# Altium footprint library Package_DFN_QFN.PcbLib: 735 footprints (part 40 of 46)
Each footprint in its own frame and in the unit in brackets; x right, y up, seen from the top. Pads: shape width x height; smd on the part's side, far side on the other; paste and mask are expansions set on the pad; w line width, h text height; cw(c..) or ccw(c..) is an arc to the next point about the centre after c.
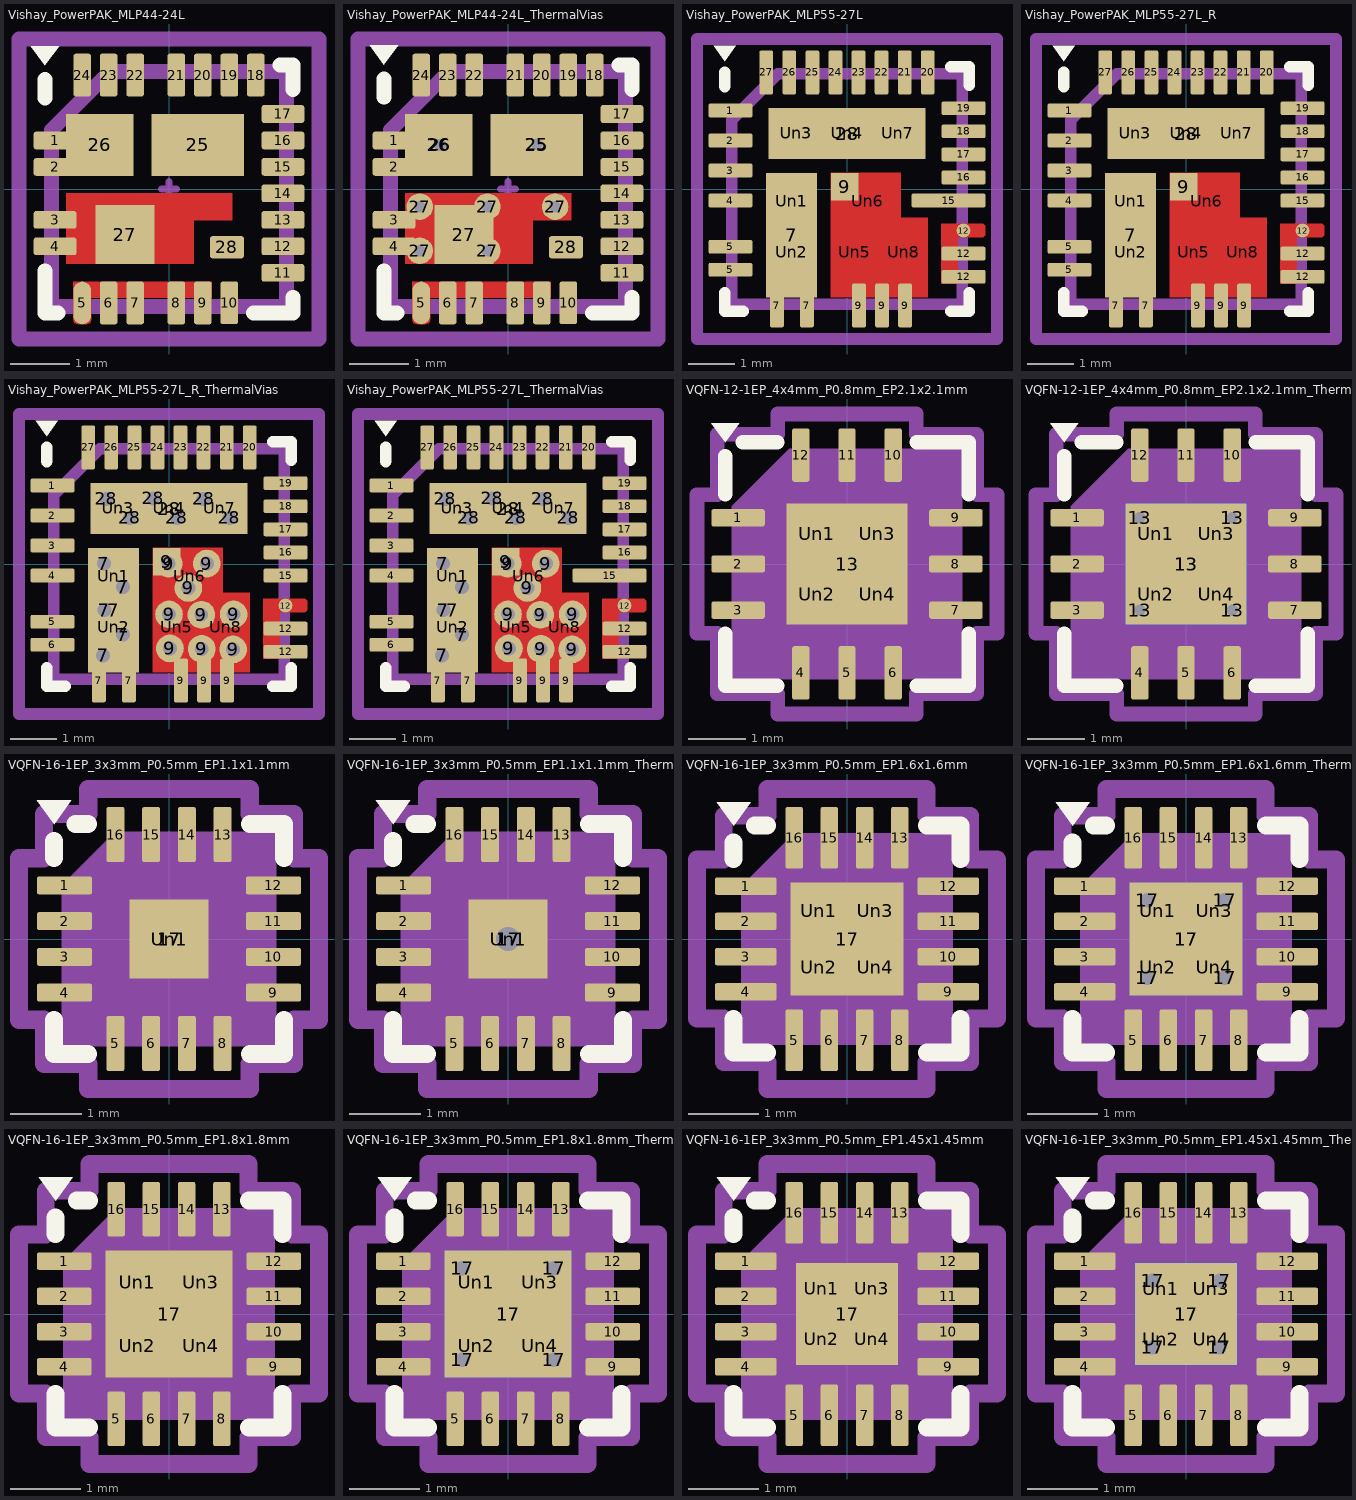
[diagram p39: the footprints below, top view; thin cyan lines are the x and y axes]

## Vishay_PowerPAK_MLP44-24L [mm] "Vishay_PowerPAK_MLP44-24L"
pads (28):
  rrect25% 0.725x0.3 smd: 1(-1.937,0.825) 2(-1.937,0.375) 3(-1.937,-0.525) 4(-1.937,-0.975) 11(1.937,-1.425) 12(1.937,-0.975) 13(1.937,-0.525) 14(1.937,-0.075) 15(1.937,0.375) 16(1.937,0.825) 17(1.937,1.275)
  oval 0.3x0.725 smd: 5(-1.475,-1.937)
  rrect25% 0.3x0.725 smd: 6(-1.025,-1.937) 7(-0.575,-1.937) 8(0.125,-1.937) 9(0.575,-1.937) 10(1.025,-1.935) 18(1.475,1.937) 19(1.025,1.937) 20(0.575,1.937) 21(0.125,1.937) 22(-0.575,1.937) 23(-1.025,1.937) 24(-1.475,1.937)
  rect 1.575x1.05 smd: 25(0.487,0.75)
  rect 1.15x1.05 smd: 26(-1.175,0.75)
  rect 1x1 smd: 27(-0.75,-0.775)
  rrect25% 0.58x0.38 smd: 28(0.985,-0.99)
F.Cu:
  region: 1.075,-0.53 0.425,-0.53 0.425,-1.275 -1.75,-1.275 -1.75,-0.075 1.075,-0.075
  region: 0.725,-1.85 -1.625,-1.85 -1.625,-1.575 0.725,-1.575
  region: -1.371,-1.581 -1.347,-1.597 -1.331,-1.621 -1.325,-1.65 -1.325,-2.225 -1.331,-2.254 -1.347,-2.278 -1.371,-2.294 -1.4,-2.3 -1.55,-2.3 -1.579,-2.294 -1.603,-2.278 -1.619,-2.254 -1.625,-2.225 -1.625,-1.65 -1.619,-1.621 -1.603,-1.597 -1.579,-1.581 -1.55,-1.575 -1.4,-1.575
F.SilkS:
  region: -2.11,2.1 -2.35,2.43 -1.87,2.43
  lines w0.254: -2.11,-1.39 -2.11,-2.11 -1.89,-2.11 ; -2.11,1.55 -2.11,1.86 ; 1.44,-2.11 2.11,-2.11 2.11,-1.84 ; 1.89,2.11 2.11,2.11 2.11,1.69
F.Paste:
  region: 1.075,-0.53 0.425,-0.53 0.425,-1.275 -1.75,-1.275 -1.75,-0.075 1.075,-0.075
  region: 0.725,-1.85 -1.625,-1.85 -1.625,-1.575 0.725,-1.575
  region: -1.371,-1.581 -1.347,-1.597 -1.331,-1.621 -1.325,-1.65 -1.325,-2.225 -1.331,-2.254 -1.347,-2.278 -1.371,-2.294 -1.4,-2.3 -1.55,-2.3 -1.579,-2.294 -1.603,-2.278 -1.619,-2.254 -1.625,-2.225 -1.625,-1.65 -1.619,-1.621 -1.603,-1.597 -1.579,-1.581 -1.55,-1.575 -1.4,-1.575
F.Mask:
  region: 1.075,-0.53 0.425,-0.53 0.425,-1.275 -1.75,-1.275 -1.75,-0.075 1.075,-0.075
  region: 0.725,-1.85 -1.625,-1.85 -1.625,-1.575 0.725,-1.575
  region: -1.371,-1.581 -1.347,-1.597 -1.331,-1.621 -1.325,-1.65 -1.325,-2.225 -1.331,-2.254 -1.347,-2.278 -1.371,-2.294 -1.4,-2.3 -1.55,-2.3 -1.579,-2.294 -1.603,-2.278 -1.619,-2.254 -1.625,-2.225 -1.625,-1.65 -1.619,-1.621 -1.603,-1.597 -1.579,-1.581 -1.55,-1.575 -1.4,-1.575
Top Component Center:
  lines w0.127: -0.127,0 0.127,0 -0.127,0 ; 0,-0.127 0,0.127 0,-0.127
Top Assembly:
  lines w0.254: -2,-2 2,-2 2,2 -1,2 -2,1 -2,-2
Top Courtyard:
  lines w0.254: -2.55,-2.55 2.55,-2.55 2.55,2.55 -2.55,2.55 -2.55,-2.55
Top Designator:
  text ".Designator" at -3.43,-0.344 h1.52
3D body "Vishay_PowerPAK_MLP44-24L.step": height 0.75, standoff -0.01, extent -2.01,-2.01 2.01,2.01

## Vishay_PowerPAK_MLP44-24L_ThermalVias [mm] "Vishay_PowerPAK_MLP44-24L_ThermalVias"
pads (35):
  rrect25% 0.725x0.3 smd: 1(-1.937,0.825) 2(-1.937,0.375) 3(-1.937,-0.525) 4(-1.937,-0.975) 11(1.937,-1.425) 12(1.937,-0.975) 13(1.937,-0.525) 14(1.937,-0.075) 15(1.937,0.375) 16(1.937,0.825) 17(1.937,1.275)
  oval 0.3x0.725 smd: 5(-1.475,-1.937)
  rrect25% 0.3x0.725 smd: 6(-1.025,-1.937) 7(-0.575,-1.937) 8(0.125,-1.937) 9(0.575,-1.937) 10(1.025,-1.935) 18(1.475,1.937) 19(1.025,1.937) 20(0.575,1.937) 21(0.125,1.937) 22(-0.575,1.937) 23(-1.025,1.937) 24(-1.475,1.937)
  rect 1.575x1.05 smd: 25(0.487,0.75)
  round 0.45 hole 0.2: 25(0.49,0.76) 26(-1.155,0.75) 27(-1.5,-1.05) 27(-1.5,-0.3) 27(-0.35,-1.05) 27(-0.35,-0.3) 27(0.8,-0.3)
  rect 1.15x1.05 smd: 26(-1.175,0.75)
  rect 1x1 smd: 27(-0.75,-0.775)
  rrect25% 0.58x0.38 smd: 28(0.985,-0.99)
F.Cu:
  region: -1.371,-1.581 -1.347,-1.597 -1.331,-1.621 -1.325,-1.65 -1.325,-2.225 -1.331,-2.254 -1.347,-2.278 -1.371,-2.294 -1.4,-2.3 -1.55,-2.3 -1.579,-2.294 -1.603,-2.278 -1.619,-2.254 -1.625,-2.225 -1.625,-1.65 -1.619,-1.621 -1.603,-1.597 -1.579,-1.581 -1.55,-1.575 -1.4,-1.575
  region: 0.725,-1.85 -1.625,-1.85 -1.625,-1.575 0.725,-1.575
  region: 1.075,-0.53 0.425,-0.53 0.425,-1.275 -1.75,-1.275 -1.75,-0.075 1.075,-0.075
F.SilkS:
  region: -2.11,2.11 -2.35,2.44 -1.87,2.44
  lines w0.254: -2.11,-1.39 -2.11,-2.11 -1.89,-2.11 ; -2.11,1.56 -2.11,1.87 ; 1.44,-2.11 2.11,-2.11 2.11,-1.84 ; 1.89,2.11 2.11,2.11 2.11,1.69
F.Paste:
  region: -1.371,-1.581 -1.347,-1.597 -1.331,-1.621 -1.325,-1.65 -1.325,-2.225 -1.331,-2.254 -1.347,-2.278 -1.371,-2.294 -1.4,-2.3 -1.55,-2.3 -1.579,-2.294 -1.603,-2.278 -1.619,-2.254 -1.625,-2.225 -1.625,-1.65 -1.619,-1.621 -1.603,-1.597 -1.579,-1.581 -1.55,-1.575 -1.4,-1.575
  region: 0.725,-1.85 -1.625,-1.85 -1.625,-1.575 0.725,-1.575
  region: 1.075,-0.53 0.425,-0.53 0.425,-1.275 -1.75,-1.275 -1.75,-0.075 1.075,-0.075
F.Mask:
  region: -1.371,-1.581 -1.347,-1.597 -1.331,-1.621 -1.325,-1.65 -1.325,-2.225 -1.331,-2.254 -1.347,-2.278 -1.371,-2.294 -1.4,-2.3 -1.55,-2.3 -1.579,-2.294 -1.603,-2.278 -1.619,-2.254 -1.625,-2.225 -1.625,-1.65 -1.619,-1.621 -1.603,-1.597 -1.579,-1.581 -1.55,-1.575 -1.4,-1.575
  region: 0.725,-1.85 -1.625,-1.85 -1.625,-1.575 0.725,-1.575
  region: 1.075,-0.53 0.425,-0.53 0.425,-1.275 -1.75,-1.275 -1.75,-0.075 1.075,-0.075
Top Component Center:
  lines w0.127: -0.127,0 0.127,0 -0.127,0 ; 0,-0.127 0,0.127 0,-0.127
Top Assembly:
  lines w0.254: -2,-2 -2,1 -1,2 2,2 2,-2 -2,-2
Top Courtyard:
  lines w0.254: -2.55,-2.55 -2.55,2.55 2.55,2.55 2.55,-2.55 -2.55,-2.55
Top Designator:
  text ".Designator" at -3.43,-0.344 h1.52
3D body "Vishay_PowerPAK_MLP44-24L.step": height 0.75, standoff -0.01, extent -2.01,-2.01 2.01,2.01

## Vishay_PowerPAK_MLP55-27L [mm] "Vishay_PowerPAK_MLP55-27L"
pads (38):
  rrect25% 0.95x0.3 smd: 1(-2.525,1.7) 2(-2.525,1.05) 3(-2.525,0.4) 4(-2.525,-0.25) 5(-2.525,-1.75) 5(-2.525,-1.25) 12(2.525,-1.9) 12(2.525,-1.4) 16(2.525,0.25) 17(2.525,0.75) 18(2.525,1.25) 19(2.525,1.75)
  rrect25% 0.3x0.95 smd: 7(-1.52,-2.525) 7(-0.87,-2.525) 9(0.26,-2.525) 9(0.76,-2.525) 9(1.26,-2.525) 20(1.75,2.525) 21(1.25,2.525) 22(0.75,2.525) 23(0.25,2.525) 24(-0.25,2.525) 25(-0.75,2.525) 26(-1.25,2.525) 27(-1.75,2.525)
  rect 1.1x2.7 smd: 7(-1.2,-1)
  rect 0.6x0.6 smd: 9(-0.05,0.05)
  round 0.3 smd: 12(2.525,-0.9)
  rrect25% 1.6x0.3 smd: 15(2.2,-0.25)
  rect 3.4x1.1 smd: 28(0,1.2)
  rrect25% 0.85x0.85 on Top Paste: Un1(-1.2,-0.27) Un2(-1.2,-1.37) Un3(-1.1,1.21) Un4(0,1.21) Un5(0.17,-1.37) Un6(0.45,-0.27) Un7(1.1,1.21) Un8(1.23,-1.37)
F.Cu:
  region: 2.954,-0.756 2.978,-0.772 2.994,-0.796 3,-0.825 3,-0.975 2.994,-1.004 2.978,-1.028 2.954,-1.044 2.925,-1.05 2.125,-1.05 2.096,-1.044 2.072,-1.028 2.056,-1.004 2.05,-0.975 2.05,-0.825 2.056,-0.796 2.072,-0.772 2.096,-0.756 2.125,-0.75 2.925,-0.75
  region: 2.395,-2.05 2.045,-2.05 2.045,-0.75 2.395,-0.75
  region: 1.17,-0.62 1.75,-0.62 1.75,-2.35 -0.35,-2.35 -0.35,0.35 1.17,0.35
F.SilkS:
  region: -2.65,2.77 -2.89,3.1 -2.41,3.1
  lines w0.254: -2.65,-2.25 -2.65,-2.65 -2.25,-2.65 ; -2.65,2.22 -2.65,2.53 ; 2.25,-2.65 2.65,-2.65 2.65,-2.25 ; 2.25,2.65 2.65,2.65 2.65,2.25
F.Paste:
  region: 2.954,-0.756 2.978,-0.772 2.994,-0.796 3,-0.825 3,-0.975 2.994,-1.004 2.978,-1.028 2.954,-1.044 2.925,-1.05 2.125,-1.05 2.096,-1.044 2.072,-1.028 2.056,-1.004 2.05,-0.975 2.05,-0.825 2.056,-0.796 2.072,-0.772 2.096,-0.756 2.125,-0.75 2.925,-0.75
  region: 2.395,-2.05 2.045,-2.05 2.045,-0.75 2.395,-0.75
F.Mask:
  region: 2.954,-0.756 2.978,-0.772 2.994,-0.796 3,-0.825 3,-0.975 2.994,-1.004 2.978,-1.028 2.954,-1.044 2.925,-1.05 2.125,-1.05 2.096,-1.044 2.072,-1.028 2.056,-1.004 2.05,-0.975 2.05,-0.825 2.056,-0.796 2.072,-0.772 2.096,-0.756 2.125,-0.75 2.925,-0.75
  region: 2.395,-2.05 2.045,-2.05 2.045,-0.75 2.395,-0.75
  region: 1.17,-0.62 1.75,-0.62 1.75,-2.35 -0.35,-2.35 -0.35,0.35 1.17,0.35
Top Component Center:
  lines w0.127: -0.127,0 0.127,0 -0.127,0 ; 0,-0.127 0,0.127 0,-0.127
Top Assembly:
  lines w0.254: -2.5,-2.5 2.5,-2.5 2.5,2.5 -1.5,2.5 -2.5,1.5 -2.5,-2.5
Top Courtyard:
  lines w0.254: -3.25,-3.25 3.25,-3.25 3.25,3.25 -3.25,3.25 -3.25,-3.25
Top Designator:
  text ".Designator" at -3.43,-0.344 h1.52

## Vishay_PowerPAK_MLP55-27L_R [mm] "Vishay_PowerPAK_MLP55-27L_R"
pads (38):
  rrect25% 0.95x0.3 smd: 1(-2.525,1.7) 2(-2.525,1.05) 3(-2.525,0.4) 4(-2.525,-0.25) 5(-2.525,-1.75) 5(-2.525,-1.25) 12(2.525,-1.9) 12(2.525,-1.4) 15(2.525,-0.25) 16(2.525,0.25) 17(2.525,0.75) 18(2.525,1.25) 19(2.525,1.75)
  rrect25% 0.3x0.95 smd: 7(-1.52,-2.525) 7(-0.87,-2.525) 9(0.26,-2.525) 9(0.76,-2.525) 9(1.26,-2.525) 20(1.75,2.525) 21(1.25,2.525) 22(0.75,2.525) 23(0.25,2.525) 24(-0.25,2.525) 25(-0.75,2.525) 26(-1.25,2.525) 27(-1.75,2.525)
  rect 1.1x2.7 smd: 7(-1.2,-1)
  rect 0.6x0.6 smd: 9(-0.05,0.05)
  round 0.3 smd: 12(2.525,-0.9)
  rect 3.4x1.1 smd: 28(0,1.2)
  rrect25% 0.85x0.85 on Top Paste: Un1(-1.2,-0.27) Un2(-1.2,-1.37) Un3(-1.1,1.21) Un4(0,1.21) Un5(0.17,-1.37) Un6(0.45,-0.27) Un7(1.1,1.21) Un8(1.23,-1.37)
F.Cu:
  region: 1.17,-0.62 1.75,-0.62 1.75,-2.35 -0.35,-2.35 -0.35,0.35 1.17,0.35
  region: 2.395,-2.05 2.045,-2.05 2.045,-0.75 2.395,-0.75
  region: 2.954,-0.756 2.978,-0.772 2.994,-0.796 3,-0.825 3,-0.975 2.994,-1.004 2.978,-1.028 2.954,-1.044 2.925,-1.05 2.125,-1.05 2.096,-1.044 2.072,-1.028 2.056,-1.004 2.05,-0.975 2.05,-0.825 2.056,-0.796 2.072,-0.772 2.096,-0.756 2.125,-0.75 2.925,-0.75
F.SilkS:
  region: -2.65,2.77 -2.89,3.1 -2.41,3.1
  lines w0.254: -2.65,-2.25 -2.65,-2.65 -2.25,-2.65 ; -2.65,2.22 -2.65,2.53 ; 2.25,-2.65 2.65,-2.65 2.65,-2.25 ; 2.25,2.65 2.65,2.65 2.65,2.25
F.Paste:
  region: 2.395,-2.05 2.045,-2.05 2.045,-0.75 2.395,-0.75
  region: 2.954,-0.756 2.978,-0.772 2.994,-0.796 3,-0.825 3,-0.975 2.994,-1.004 2.978,-1.028 2.954,-1.044 2.925,-1.05 2.125,-1.05 2.096,-1.044 2.072,-1.028 2.056,-1.004 2.05,-0.975 2.05,-0.825 2.056,-0.796 2.072,-0.772 2.096,-0.756 2.125,-0.75 2.925,-0.75
F.Mask:
  region: 1.17,-0.62 1.75,-0.62 1.75,-2.35 -0.35,-2.35 -0.35,0.35 1.17,0.35
  region: 2.395,-2.05 2.045,-2.05 2.045,-0.75 2.395,-0.75
  region: 2.954,-0.756 2.978,-0.772 2.994,-0.796 3,-0.825 3,-0.975 2.994,-1.004 2.978,-1.028 2.954,-1.044 2.925,-1.05 2.125,-1.05 2.096,-1.044 2.072,-1.028 2.056,-1.004 2.05,-0.975 2.05,-0.825 2.056,-0.796 2.072,-0.772 2.096,-0.756 2.125,-0.75 2.925,-0.75
Top Component Center:
  lines w0.127: -0.127,0 0.127,0 -0.127,0 ; 0,-0.127 0,0.127 0,-0.127
Top Assembly:
  lines w0.254: -2.5,-2.5 -2.5,1.5 -1.5,2.5 2.5,2.5 2.5,-2.5 -2.5,-2.5
Top Courtyard:
  lines w0.254: -3.25,-3.25 -3.25,3.25 3.25,3.25 3.25,-3.25 -3.25,-3.25
Top Designator:
  text ".Designator" at -3.43,-0.344 h1.52

## Vishay_PowerPAK_MLP55-27L_R_ThermalVias [mm] "Vishay_PowerPAK_MLP55-27L_R_ThermalVias"
pads (58):
  rrect25% 0.95x0.3 smd: 1(-2.525,1.7) 2(-2.525,1.05) 3(-2.525,0.4) 4(-2.525,-0.25) 5(-2.525,-1.25) 6(-2.525,-1.75) 12(2.525,-1.9) 12(2.525,-1.4) 15(2.525,-0.25) 16(2.525,0.25) 17(2.525,0.75) 18(2.525,1.25) 19(2.525,1.75)
  rrect25% 0.3x0.95 smd: 7(-1.52,-2.525) 7(-0.87,-2.525) 9(0.26,-2.525) 9(0.76,-2.525) 9(1.26,-2.525) 20(1.75,2.525) 21(1.25,2.525) 22(0.75,2.525) 23(0.25,2.525) 24(-0.25,2.525) 25(-0.75,2.525) 26(-1.25,2.525) 27(-1.75,2.525)
  round 0.6 hole 0.3: 7(-1.43,-1.98) 7(-1.41,0.01) 7(-1.4,-1) 7(-1,-1.53) 7(-1,-0.5) 9(-0.01,0.01) 9(0,-1.09) 9(0.02,-1.83) 9(0.42,-0.52) 9(0.7,-1.1) 9(0.71,-1.84) 9(0.82,0.01) 9(1.39,-1.85) 9(1.4,-1.09) 28(-1.36,1.41) 28(-0.85,1) 28(-0.34,1.42) 28(0.17,1) 28(0.75,1.41) 28(1.31,1)
  rect 1.1x2.7 smd: 7(-1.2,-1)
  rect 0.6x0.6 smd: 9(-0.05,0.05)
  round 0.3 smd: 12(2.525,-0.9)
  rect 3.4x1.1 smd: 28(0,1.2)
  rrect25% 0.85x0.85 on Top Paste: Un1(-1.2,-0.27) Un2(-1.2,-1.37) Un3(-1.1,1.21) Un4(0,1.21) Un5(0.17,-1.37) Un6(0.45,-0.27) Un7(1.1,1.21) Un8(1.23,-1.37)
F.Cu:
  region: 1.17,-0.62 1.75,-0.62 1.75,-2.35 -0.35,-2.35 -0.35,0.35 1.17,0.35
  region: 2.954,-0.756 2.978,-0.772 2.994,-0.796 3,-0.825 3,-0.975 2.994,-1.004 2.978,-1.028 2.954,-1.044 2.925,-1.05 2.125,-1.05 2.096,-1.044 2.072,-1.028 2.056,-1.004 2.05,-0.975 2.05,-0.825 2.056,-0.796 2.072,-0.772 2.096,-0.756 2.125,-0.75 2.925,-0.75
  region: 2.395,-2.05 2.045,-2.05 2.045,-0.75 2.395,-0.75
F.SilkS:
  region: -2.65,2.77 -2.89,3.1 -2.41,3.1
  lines w0.254: -2.65,-2.25 -2.65,-2.65 -2.25,-2.65 ; -2.65,2.22 -2.65,2.53 ; 2.25,-2.65 2.65,-2.65 2.65,-2.25 ; 2.25,2.65 2.65,2.65 2.65,2.25
F.Paste:
  region: 2.954,-0.756 2.978,-0.772 2.994,-0.796 3,-0.825 3,-0.975 2.994,-1.004 2.978,-1.028 2.954,-1.044 2.925,-1.05 2.125,-1.05 2.096,-1.044 2.072,-1.028 2.056,-1.004 2.05,-0.975 2.05,-0.825 2.056,-0.796 2.072,-0.772 2.096,-0.756 2.125,-0.75 2.925,-0.75
  region: 2.395,-2.05 2.045,-2.05 2.045,-0.75 2.395,-0.75
F.Mask:
  region: 1.17,-0.62 1.75,-0.62 1.75,-2.35 -0.35,-2.35 -0.35,0.35 1.17,0.35
  region: 2.954,-0.756 2.978,-0.772 2.994,-0.796 3,-0.825 3,-0.975 2.994,-1.004 2.978,-1.028 2.954,-1.044 2.925,-1.05 2.125,-1.05 2.096,-1.044 2.072,-1.028 2.056,-1.004 2.05,-0.975 2.05,-0.825 2.056,-0.796 2.072,-0.772 2.096,-0.756 2.125,-0.75 2.925,-0.75
  region: 2.395,-2.05 2.045,-2.05 2.045,-0.75 2.395,-0.75
Top Component Center:
  lines w0.127: -0.127,0 0.127,0 -0.127,0 ; 0,-0.127 0,0.127 0,-0.127
Top Assembly:
  lines w0.254: -2.5,-2.5 -2.5,1.5 -1.5,2.5 2.5,2.5 2.5,-2.5 -2.5,-2.5
Top Courtyard:
  lines w0.254: -3.25,-3.25 -3.25,3.25 3.25,3.25 3.25,-3.25 -3.25,-3.25
Top Designator:
  text ".Designator" at -3.44,-0.334 h1.52

## Vishay_PowerPAK_MLP55-27L_ThermalVias [mm] "Vishay_PowerPAK_MLP55-27L_ThermalVias"
pads (58):
  rrect25% 0.95x0.3 smd: 1(-2.525,1.7) 2(-2.525,1.05) 3(-2.525,0.4) 4(-2.525,-0.25) 5(-2.525,-1.25) 6(-2.525,-1.75) 12(2.525,-1.9) 12(2.525,-1.4) 16(2.525,0.25) 17(2.525,0.75) 18(2.525,1.25) 19(2.525,1.75)
  rrect25% 0.3x0.95 smd: 7(-1.52,-2.525) 7(-0.87,-2.525) 9(0.26,-2.525) 9(0.76,-2.525) 9(1.26,-2.525) 20(1.75,2.525) 21(1.25,2.525) 22(0.75,2.525) 23(0.25,2.525) 24(-0.25,2.525) 25(-0.75,2.525) 26(-1.25,2.525) 27(-1.75,2.525)
  round 0.6 hole 0.3: 7(-1.43,-1.98) 7(-1.41,0.01) 7(-1.4,-1) 7(-1,-1.53) 7(-1,-0.5) 9(-0.01,0.01) 9(0,-1.09) 9(0.02,-1.83) 9(0.42,-0.52) 9(0.7,-1.1) 9(0.71,-1.84) 9(0.82,0.01) 9(1.39,-1.85) 9(1.4,-1.09) 28(-1.36,1.41) 28(-0.85,1) 28(-0.34,1.42) 28(0.17,1) 28(0.75,1.41) 28(1.31,1)
  rect 1.1x2.7 smd: 7(-1.2,-1)
  rect 0.6x0.6 smd: 9(-0.05,0.05)
  round 0.3 smd: 12(2.525,-0.9)
  rrect25% 1.6x0.3 smd: 15(2.2,-0.25)
  rect 3.4x1.1 smd: 28(0,1.2)
  rrect25% 0.85x0.85 on Top Paste: Un1(-1.2,-0.27) Un2(-1.2,-1.37) Un3(-1.1,1.21) Un4(0,1.21) Un5(0.17,-1.37) Un6(0.45,-0.27) Un7(1.1,1.21) Un8(1.23,-1.37)
F.Cu:
  region: 1.17,-0.62 1.75,-0.62 1.75,-2.35 -0.35,-2.35 -0.35,0.35 1.17,0.35
  region: 2.954,-0.756 2.978,-0.772 2.994,-0.796 3,-0.825 3,-0.975 2.994,-1.004 2.978,-1.028 2.954,-1.044 2.925,-1.05 2.125,-1.05 2.096,-1.044 2.072,-1.028 2.056,-1.004 2.05,-0.975 2.05,-0.825 2.056,-0.796 2.072,-0.772 2.096,-0.756 2.125,-0.75 2.925,-0.75
  region: 2.395,-2.05 2.045,-2.05 2.045,-0.75 2.395,-0.75
F.SilkS:
  region: -2.65,2.77 -2.89,3.1 -2.41,3.1
  lines w0.254: -2.65,-2.25 -2.65,-2.65 -2.25,-2.65 ; -2.65,2.22 -2.65,2.53 ; 2.25,-2.65 2.65,-2.65 2.65,-2.25 ; 2.25,2.65 2.65,2.65 2.65,2.25
F.Paste:
  region: 2.954,-0.756 2.978,-0.772 2.994,-0.796 3,-0.825 3,-0.975 2.994,-1.004 2.978,-1.028 2.954,-1.044 2.925,-1.05 2.125,-1.05 2.096,-1.044 2.072,-1.028 2.056,-1.004 2.05,-0.975 2.05,-0.825 2.056,-0.796 2.072,-0.772 2.096,-0.756 2.125,-0.75 2.925,-0.75
  region: 2.395,-2.05 2.045,-2.05 2.045,-0.75 2.395,-0.75
F.Mask:
  region: 1.17,-0.62 1.75,-0.62 1.75,-2.35 -0.35,-2.35 -0.35,0.35 1.17,0.35
  region: 2.954,-0.756 2.978,-0.772 2.994,-0.796 3,-0.825 3,-0.975 2.994,-1.004 2.978,-1.028 2.954,-1.044 2.925,-1.05 2.125,-1.05 2.096,-1.044 2.072,-1.028 2.056,-1.004 2.05,-0.975 2.05,-0.825 2.056,-0.796 2.072,-0.772 2.096,-0.756 2.125,-0.75 2.925,-0.75
  region: 2.395,-2.05 2.045,-2.05 2.045,-0.75 2.395,-0.75
Top Component Center:
  lines w0.127: -0.127,0 0.127,0 -0.127,0 ; 0,-0.127 0,0.127 0,-0.127
Top Assembly:
  lines w0.254: -2.5,-2.5 -2.5,1.5 -1.5,2.5 2.5,2.5 2.5,-2.5 -2.5,-2.5
Top Courtyard:
  lines w0.254: -3.25,-3.25 -3.25,3.25 3.25,3.25 3.25,-3.25 -3.25,-3.25
Top Designator:
  text ".Designator" at -3.44,-0.334 h1.52

## VQFN-12-1EP_4x4mm_P0.8mm_EP2.1x2.1mm [mm] "VQFN-12-1EP_4x4mm_P0.8mm_EP2.1x2.1mm"
pads (17):
  rrect25% 0.925x0.3 smd: 1(-1.887,0.8) 2(-1.887,0) 3(-1.887,-0.8) 7(1.887,-0.8) 8(1.887,0) 9(1.887,0.8)
  rrect25% 0.3x0.925 smd: 4(-0.8,-1.887) 5(0,-1.887) 6(0.8,-1.887) 10(0.8,1.887) 11(0,1.887) 12(-0.8,1.887)
  rect 2.1x2.1 smd: 13(0,0)
  rrect25% 0.85x0.85 on Top Paste: Un1(-0.525,0.525) Un2(-0.525,-0.525) Un3(0.525,0.525) Un4(0.525,-0.525)
F.SilkS:
  region: -2.11,2.11 -2.35,2.44 -1.87,2.44
  lines w0.254: -2.11,-1.21 -2.11,-2.11 -1.21,-2.11 ; -2.11,1.21 -2.11,1.87 ; -1.81,2.11 -1.21,2.11 ; 1.21,-2.11 2.11,-2.11 2.11,-1.21 ; 1.21,2.11 2.11,2.11 2.11,1.21
Top Component Center:
  lines w0.127: -0.127,0 0.127,0 -0.127,0 ; 0,-0.127 0,0.127 0,-0.127
Top Assembly:
  region: 2,-2 -2,-2 -2,1 -1,2 2,2
Top Courtyard:
  lines w0.254: -2.6,-1.2 -2.25,-1.2 -2.25,-2.25 -1.2,-2.25 -1.2,-2.6 1.2,-2.6 1.2,-2.25 2.25,-2.25 2.25,-1.2 2.6,-1.2 2.6,1.2 2.25,1.2 2.25,2.25 1.2,2.25 1.2,2.6 -1.2,2.6 -1.2,2.25 -2.25,2.25 -2.25,1.2 -2.6,1.2 -2.6,-1.2
Top Designator:
  text ".Designator" at -3.43,-0.344 h1.52
3D body "VQFN-12-1EP_4x4mm_P0.8mm_EP2.1x2.1mm.step": height 0.85, standoff 0, extent -2,-2 2,2

## VQFN-12-1EP_4x4mm_P0.8mm_EP2.1x2.1mm_ThermalVias [mm] "VQFN-12-1EP_4x4mm_P0.8mm_EP2.1x2.1mm_ThermalVias"
pads (22):
  rrect25% 0.925x0.3 smd: 1(-1.887,0.8) 2(-1.887,0) 3(-1.887,-0.8) 7(1.887,-0.8) 8(1.887,0) 9(1.887,0.8)
  rrect25% 0.3x0.925 smd: 4(-0.8,-1.887) 5(0,-1.887) 6(0.8,-1.887) 10(0.8,1.887) 11(0,1.887) 12(-0.8,1.887)
  round 0.5 hole 0.2: 13(-0.8,-0.8) 13(-0.8,0.8) 13(0.8,-0.8) 13(0.8,0.8)
  rect 2.1x2.1 smd: 13(0,0)
  rect 2.1x2.1 smd far side: 13(0,0)
  rrect25% 0.85x0.85 on Top Paste: Un1(-0.525,0.525) Un2(-0.525,-0.525) Un3(0.525,0.525) Un4(0.525,-0.525)
F.SilkS:
  region: -2.11,2.11 -2.35,2.44 -1.87,2.44
  lines w0.254: -2.11,-1.21 -2.11,-2.11 -1.21,-2.11 ; -2.11,1.21 -2.11,1.87 ; -1.81,2.11 -1.21,2.11 ; 1.21,-2.11 2.11,-2.11 2.11,-1.21 ; 1.21,2.11 2.11,2.11 2.11,1.21
Top Component Center:
  lines w0.127: -0.127,0 0.127,0 -0.127,0 ; 0,-0.127 0,0.127 0,-0.127
Top Assembly:
  region: 2,-2 -2,-2 -2,1 -1,2 2,2
Top Courtyard:
  lines w0.254: -2.6,-1.2 -2.25,-1.2 -2.25,-2.25 -1.2,-2.25 -1.2,-2.6 1.2,-2.6 1.2,-2.25 2.25,-2.25 2.25,-1.2 2.6,-1.2 2.6,1.2 2.25,1.2 2.25,2.25 1.2,2.25 1.2,2.6 -1.2,2.6 -1.2,2.25 -2.25,2.25 -2.25,1.2 -2.6,1.2 -2.6,-1.2
Top Designator:
  text ".Designator" at -3.43,-0.344 h1.52
3D body "VQFN-12-1EP_4x4mm_P0.8mm_EP2.1x2.1mm.step": height 0.85, standoff 0, extent -2,-2 2,2

## VQFN-16-1EP_3x3mm_P0.5mm_EP1.1x1.1mm [mm] "VQFN-16-1EP_3x3mm_P0.5mm_EP1.1x1.1mm"
pads (18):
  rrect25% 0.775x0.25 smd: 1(-1.462,0.75) 2(-1.462,0.25) 3(-1.462,-0.25) 4(-1.462,-0.75) 9(1.462,-0.75) 10(1.462,-0.25) 11(1.462,0.25) 12(1.462,0.75)
  rrect25% 0.25x0.775 smd: 5(-0.75,-1.462) 6(-0.25,-1.462) 7(0.25,-1.462) 8(0.75,-1.462) 13(0.75,1.462) 14(0.25,1.462) 15(-0.25,1.462) 16(-0.75,1.462)
  rect 1.1x1.1 smd: 17(0,0)
  rrect25% 0.89x0.89 on Top Paste: Un1(0,0)
F.SilkS:
  region: -1.61,1.61 -1.85,1.94 -1.37,1.94
  lines w0.254: -1.61,-1.135 -1.61,-1.61 -1.135,-1.61 ; -1.61,1.135 -1.61,1.37 ; -1.31,1.61 -1.135,1.61 ; 1.135,-1.61 1.61,-1.61 1.61,-1.135 ; 1.135,1.61 1.61,1.61 1.61,1.135
Top Component Center:
  lines w0.127: -0.127,0 0.127,0 -0.127,0 ; 0,-0.127 0,0.127 0,-0.127
Top Assembly:
  region: 1.5,-1.5 -1.5,-1.5 -1.5,0.75 -0.75,1.5 1.5,1.5
Top Courtyard:
  lines w0.254: -2.1,-1.13 -1.75,-1.13 -1.75,-1.75 -1.13,-1.75 -1.13,-2.1 1.13,-2.1 1.13,-1.75 1.75,-1.75 1.75,-1.13 2.1,-1.13 2.1,1.13 1.75,1.13 1.75,1.75 1.13,1.75 1.13,2.1 -1.13,2.1 -1.13,1.75 -1.75,1.75 -1.75,1.13 -2.1,1.13 -2.1,-1.13
Top Designator:
  text ".Designator" at -3.43,-0.344 h1.52

## VQFN-16-1EP_3x3mm_P0.5mm_EP1.1x1.1mm_ThermalVias [mm] "VQFN-16-1EP_3x3mm_P0.5mm_EP1.1x1.1mm_ThermalVias"
pads (20):
  rrect25% 0.775x0.25 smd: 1(-1.462,0.75) 2(-1.462,0.25) 3(-1.462,-0.25) 4(-1.462,-0.75) 9(1.462,-0.75) 10(1.462,-0.25) 11(1.462,0.25) 12(1.462,0.75)
  rrect25% 0.25x0.775 smd: 5(-0.75,-1.462) 6(-0.25,-1.462) 7(0.25,-1.462) 8(0.75,-1.462) 13(0.75,1.462) 14(0.25,1.462) 15(-0.25,1.462) 16(-0.75,1.462)
  rect 1.1x1.1 smd: 17(0,0)
  round 0.63 hole 0.33: 17(0,0)
  rect 0.63x0.63 smd far side: 17(0,0)
  rrect25% 0.89x0.89 on Top Paste: Un1(0,0)
F.SilkS:
  region: -1.61,1.61 -1.85,1.94 -1.37,1.94
  lines w0.254: -1.61,-1.135 -1.61,-1.61 -1.135,-1.61 ; -1.61,1.135 -1.61,1.37 ; -1.31,1.61 -1.135,1.61 ; 1.135,-1.61 1.61,-1.61 1.61,-1.135 ; 1.135,1.61 1.61,1.61 1.61,1.135
Top Component Center:
  lines w0.127: -0.127,0 0.127,0 -0.127,0 ; 0,-0.127 0,0.127 0,-0.127
Top Assembly:
  region: 1.5,-1.5 -1.5,-1.5 -1.5,0.75 -0.75,1.5 1.5,1.5
Top Courtyard:
  lines w0.254: -2.1,-1.13 -2.1,1.13 -1.75,1.13 -1.75,1.75 -1.13,1.75 -1.13,2.1 1.13,2.1 1.13,1.75 1.75,1.75 1.75,1.13 2.1,1.13 2.1,-1.13 1.75,-1.13 1.75,-1.75 1.13,-1.75 1.13,-2.1 -1.13,-2.1 -1.13,-1.75 -1.75,-1.75 -1.75,-1.13 -2.1,-1.13
Top Designator:
  text ".Designator" at -3.43,-0.344 h1.52

## VQFN-16-1EP_3x3mm_P0.5mm_EP1.6x1.6mm [mm] "VQFN-16-1EP_3x3mm_P0.5mm_EP1.6x1.6mm"
pads (21):
  rrect25% 0.875x0.25 smd: 1(-1.438,0.75) 2(-1.438,0.25) 3(-1.438,-0.25) 4(-1.438,-0.75) 9(1.438,-0.75) 10(1.438,-0.25) 11(1.438,0.25) 12(1.438,0.75)
  rrect25% 0.25x0.875 smd: 5(-0.75,-1.438) 6(-0.25,-1.438) 7(0.25,-1.438) 8(0.75,-1.438) 13(0.75,1.438) 14(0.25,1.438) 15(-0.25,1.438) 16(-0.75,1.438)
  rect 1.6x1.6 smd: 17(0,0)
  rrect25% 0.64x0.64 on Top Paste: Un1(-0.4,0.4) Un2(-0.4,-0.4) Un3(0.4,0.4) Un4(0.4,-0.4)
F.SilkS:
  region: -1.61,1.61 -1.85,1.94 -1.37,1.94
  lines w0.254: -1.61,-1.135 -1.61,-1.61 -1.135,-1.61 ; -1.61,1.135 -1.61,1.37 ; -1.31,1.61 -1.135,1.61 ; 1.135,-1.61 1.61,-1.61 1.61,-1.135 ; 1.135,1.61 1.61,1.61 1.61,1.135
Top Component Center:
  lines w0.127: -0.127,0 0.127,0 -0.127,0 ; 0,-0.127 0,0.127 0,-0.127
Top Assembly:
  region: 1.5,-1.5 -1.5,-1.5 -1.5,0.75 -0.75,1.5 1.5,1.5
Top Courtyard:
  lines w0.254: -2.13,-1.13 -1.75,-1.13 -1.75,-1.75 -1.13,-1.75 -1.13,-2.13 1.13,-2.13 1.13,-1.75 1.75,-1.75 1.75,-1.13 2.13,-1.13 2.13,1.13 1.75,1.13 1.75,1.75 1.13,1.75 1.13,2.13 -1.13,2.13 -1.13,1.75 -1.75,1.75 -1.75,1.13 -2.13,1.13 -2.13,-1.13
Top Designator:
  text ".Designator" at -3.43,-0.344 h1.52

## VQFN-16-1EP_3x3mm_P0.5mm_EP1.6x1.6mm_ThermalVias [mm] "VQFN-16-1EP_3x3mm_P0.5mm_EP1.6x1.6mm_ThermalVias"
pads (26):
  rrect25% 0.875x0.25 smd: 1(-1.438,0.75) 2(-1.438,0.25) 3(-1.438,-0.25) 4(-1.438,-0.75) 9(1.438,-0.75) 10(1.438,-0.25) 11(1.438,0.25) 12(1.438,0.75)
  rrect25% 0.25x0.875 smd: 5(-0.75,-1.438) 6(-0.25,-1.438) 7(0.25,-1.438) 8(0.75,-1.438) 13(0.75,1.438) 14(0.25,1.438) 15(-0.25,1.438) 16(-0.75,1.438)
  round 0.5 hole 0.2: 17(-0.55,-0.55) 17(-0.55,0.55) 17(0.55,-0.55) 17(0.55,0.55)
  rect 1.6x1.6 smd: 17(0,0)
  rect 1.6x1.6 smd far side: 17(0,0)
  rrect25% 0.69x0.69 on Top Paste: Un1(-0.4,0.4) Un2(-0.4,-0.4) Un3(0.4,0.4) Un4(0.4,-0.4)
F.SilkS:
  region: -1.61,1.61 -1.85,1.94 -1.37,1.94
  lines w0.254: -1.61,-1.135 -1.61,-1.61 -1.135,-1.61 ; -1.61,1.135 -1.61,1.37 ; -1.31,1.61 -1.135,1.61 ; 1.135,-1.61 1.61,-1.61 1.61,-1.135 ; 1.135,1.61 1.61,1.61 1.61,1.135
Top Component Center:
  lines w0.127: -0.127,0 0.127,0 -0.127,0 ; 0,-0.127 0,0.127 0,-0.127
Top Assembly:
  region: 1.5,-1.5 -1.5,-1.5 -1.5,0.75 -0.75,1.5 1.5,1.5
Top Courtyard:
  lines w0.254: -2.13,-1.13 -2.13,1.13 -1.75,1.13 -1.75,1.75 -1.13,1.75 -1.13,2.13 1.13,2.13 1.13,1.75 1.75,1.75 1.75,1.13 2.13,1.13 2.13,-1.13 1.75,-1.13 1.75,-1.75 1.13,-1.75 1.13,-2.13 -1.13,-2.13 -1.13,-1.75 -1.75,-1.75 -1.75,-1.13 -2.13,-1.13
Top Designator:
  text ".Designator" at -3.43,-0.344 h1.52

## VQFN-16-1EP_3x3mm_P0.5mm_EP1.8x1.8mm [mm] "VQFN-16-1EP_3x3mm_P0.5mm_EP1.8x1.8mm"
pads (21):
  rrect25% 0.775x0.25 smd: 1(-1.488,0.75) 2(-1.488,0.25) 3(-1.488,-0.25) 4(-1.488,-0.75) 9(1.488,-0.75) 10(1.488,-0.25) 11(1.488,0.25) 12(1.488,0.75)
  rrect25% 0.25x0.775 smd: 5(-0.75,-1.488) 6(-0.25,-1.488) 7(0.25,-1.488) 8(0.75,-1.488) 13(0.75,1.488) 14(0.25,1.488) 15(-0.25,1.488) 16(-0.75,1.488)
  rect 1.8x1.8 smd: 17(0,0)
  rrect25% 0.73x0.73 on Top Paste: Un1(-0.45,0.45) Un2(-0.45,-0.45) Un3(0.45,0.45) Un4(0.45,-0.45)
F.SilkS:
  region: -1.61,1.61 -1.85,1.94 -1.37,1.94
  lines w0.254: -1.61,-1.135 -1.61,-1.61 -1.135,-1.61 ; -1.61,1.135 -1.61,1.37 ; -1.31,1.61 -1.135,1.61 ; 1.135,-1.61 1.61,-1.61 1.61,-1.135 ; 1.135,1.61 1.61,1.61 1.61,1.135
Top Component Center:
  lines w0.127: -0.127,0 0.127,0 -0.127,0 ; 0,-0.127 0,0.127 0,-0.127
Top Assembly:
  region: 1.5,-1.5 -1.5,-1.5 -1.5,0.75 -0.75,1.5 1.5,1.5
Top Courtyard:
  lines w0.254: -2.13,-1.13 -1.75,-1.13 -1.75,-1.75 -1.13,-1.75 -1.13,-2.13 1.13,-2.13 1.13,-1.75 1.75,-1.75 1.75,-1.13 2.13,-1.13 2.13,1.13 1.75,1.13 1.75,1.75 1.13,1.75 1.13,2.13 -1.13,2.13 -1.13,1.75 -1.75,1.75 -1.75,1.13 -2.13,1.13 -2.13,-1.13
Top Designator:
  text ".Designator" at -3.43,-0.344 h1.52

## VQFN-16-1EP_3x3mm_P0.5mm_EP1.8x1.8mm_ThermalVias [mm] "VQFN-16-1EP_3x3mm_P0.5mm_EP1.8x1.8mm_ThermalVias"
pads (26):
  rrect25% 0.775x0.25 smd: 1(-1.488,0.75) 2(-1.488,0.25) 3(-1.488,-0.25) 4(-1.488,-0.75) 9(1.488,-0.75) 10(1.488,-0.25) 11(1.488,0.25) 12(1.488,0.75)
  rrect25% 0.25x0.775 smd: 5(-0.75,-1.488) 6(-0.25,-1.488) 7(0.25,-1.488) 8(0.75,-1.488) 13(0.75,1.488) 14(0.25,1.488) 15(-0.25,1.488) 16(-0.75,1.488)
  round 0.5 hole 0.2: 17(-0.65,-0.65) 17(-0.65,0.65) 17(0.65,-0.65) 17(0.65,0.65)
  rect 1.8x1.8 smd: 17(0,0)
  rect 1.8x1.8 smd far side: 17(0,0)
  rrect25% 0.78x0.78 on Top Paste: Un1(-0.45,0.45) Un2(-0.45,-0.45) Un3(0.45,0.45) Un4(0.45,-0.45)
F.SilkS:
  region: -1.61,1.61 -1.85,1.94 -1.37,1.94
  lines w0.254: -1.61,-1.135 -1.61,-1.61 -1.135,-1.61 ; -1.61,1.135 -1.61,1.37 ; -1.31,1.61 -1.135,1.61 ; 1.135,-1.61 1.61,-1.61 1.61,-1.135 ; 1.135,1.61 1.61,1.61 1.61,1.135
Top Component Center:
  lines w0.127: -0.127,0 0.127,0 -0.127,0 ; 0,-0.127 0,0.127 0,-0.127
Top Assembly:
  region: 1.5,-1.5 -1.5,-1.5 -1.5,0.75 -0.75,1.5 1.5,1.5
Top Courtyard:
  lines w0.254: -2.13,-1.13 -1.75,-1.13 -1.75,-1.75 -1.13,-1.75 -1.13,-2.13 1.13,-2.13 1.13,-1.75 1.75,-1.75 1.75,-1.13 2.13,-1.13 2.13,1.13 1.75,1.13 1.75,1.75 1.13,1.75 1.13,2.13 -1.13,2.13 -1.13,1.75 -1.75,1.75 -1.75,1.13 -2.13,1.13 -2.13,-1.13
Top Designator:
  text ".Designator" at -3.43,-0.344 h1.52

## VQFN-16-1EP_3x3mm_P0.5mm_EP1.45x1.45mm [mm] "VQFN-16-1EP_3x3mm_P0.5mm_EP1.45x1.45mm"
pads (21):
  rrect25% 0.875x0.25 smd: 1(-1.438,0.75) 2(-1.438,0.25) 3(-1.438,-0.25) 4(-1.438,-0.75) 9(1.438,-0.75) 10(1.438,-0.25) 11(1.438,0.25) 12(1.438,0.75)
  rrect25% 0.25x0.875 smd: 5(-0.75,-1.438) 6(-0.25,-1.438) 7(0.25,-1.438) 8(0.75,-1.438) 13(0.75,1.438) 14(0.25,1.438) 15(-0.25,1.438) 16(-0.75,1.438)
  rect 1.45x1.45 smd: 17(0,0)
  rrect25% 0.58x0.58 on Top Paste: Un1(-0.36,0.36) Un2(-0.36,-0.36) Un3(0.36,0.36) Un4(0.36,-0.36)
F.SilkS:
  region: -1.61,1.61 -1.85,1.94 -1.37,1.94
  lines w0.254: -1.61,-1.135 -1.61,-1.61 -1.135,-1.61 ; -1.61,1.135 -1.61,1.37 ; -1.31,1.61 -1.135,1.61 ; 1.135,-1.61 1.61,-1.61 1.61,-1.135 ; 1.135,1.61 1.61,1.61 1.61,1.135
Top Component Center:
  lines w0.127: -0.127,0 0.127,0 -0.127,0 ; 0,-0.127 0,0.127 0,-0.127
Top Assembly:
  region: 1.5,-1.5 -1.5,-1.5 -1.5,0.75 -0.75,1.5 1.5,1.5
Top Courtyard:
  lines w0.254: -2.13,-1.13 -1.75,-1.13 -1.75,-1.75 -1.13,-1.75 -1.13,-2.13 1.13,-2.13 1.13,-1.75 1.75,-1.75 1.75,-1.13 2.13,-1.13 2.13,1.13 1.75,1.13 1.75,1.75 1.13,1.75 1.13,2.13 -1.13,2.13 -1.13,1.75 -1.75,1.75 -1.75,1.13 -2.13,1.13 -2.13,-1.13
Top Designator:
  text ".Designator" at -3.43,-0.344 h1.52

## VQFN-16-1EP_3x3mm_P0.5mm_EP1.45x1.45mm_ThermalVias [mm] "VQFN-16-1EP_3x3mm_P0.5mm_EP1.45x1.45mm_ThermalVias"
pads (26):
  rrect25% 0.875x0.25 smd: 1(-1.438,0.75) 2(-1.438,0.25) 3(-1.438,-0.25) 4(-1.438,-0.75) 9(1.438,-0.75) 10(1.438,-0.25) 11(1.438,0.25) 12(1.438,0.75)
  rrect25% 0.25x0.875 smd: 5(-0.75,-1.438) 6(-0.25,-1.438) 7(0.25,-1.438) 8(0.75,-1.438) 13(0.75,1.438) 14(0.25,1.438) 15(-0.25,1.438) 16(-0.75,1.438)
  round 0.5 hole 0.2: 17(-0.475,-0.475) 17(-0.475,0.475) 17(0.475,-0.475) 17(0.475,0.475)
  rect 1.45x1.45 smd: 17(0,0)
  rect 1.45x1.45 smd far side: 17(0,0)
  rrect25% 0.63x0.63 on Top Paste: Un1(-0.36,0.36) Un2(-0.36,-0.36) Un3(0.36,0.36) Un4(0.36,-0.36)
F.SilkS:
  region: -1.61,1.61 -1.85,1.94 -1.37,1.94
  lines w0.254: -1.61,-1.135 -1.61,-1.61 -1.135,-1.61 ; -1.61,1.135 -1.61,1.37 ; -1.31,1.61 -1.135,1.61 ; 1.135,-1.61 1.61,-1.61 1.61,-1.135 ; 1.135,1.61 1.61,1.61 1.61,1.135
Top Component Center:
  lines w0.127: -0.127,0 0.127,0 -0.127,0 ; 0,-0.127 0,0.127 0,-0.127
Top Assembly:
  region: 1.5,-1.5 -1.5,-1.5 -1.5,0.75 -0.75,1.5 1.5,1.5
Top Courtyard:
  lines w0.254: -2.13,-1.13 -1.75,-1.13 -1.75,-1.75 -1.13,-1.75 -1.13,-2.13 1.13,-2.13 1.13,-1.75 1.75,-1.75 1.75,-1.13 2.13,-1.13 2.13,1.13 1.75,1.13 1.75,1.75 1.13,1.75 1.13,2.13 -1.13,2.13 -1.13,1.75 -1.75,1.75 -1.75,1.13 -2.13,1.13 -2.13,-1.13
Top Designator:
  text ".Designator" at -3.43,-0.344 h1.52